# Altium footprint library Orion-Bridge.PcbLib: 19 footprints (part 1 of 2)
Each footprint in its own frame and in the unit in brackets; x right, y up, seen from the top. Pads: shape width x height; smd on the part's side, far side on the other; paste and mask are expansions set on the pad; w line width, h text height; cw(c..) or ccw(c..) is an arc to the next point about the centre after c.
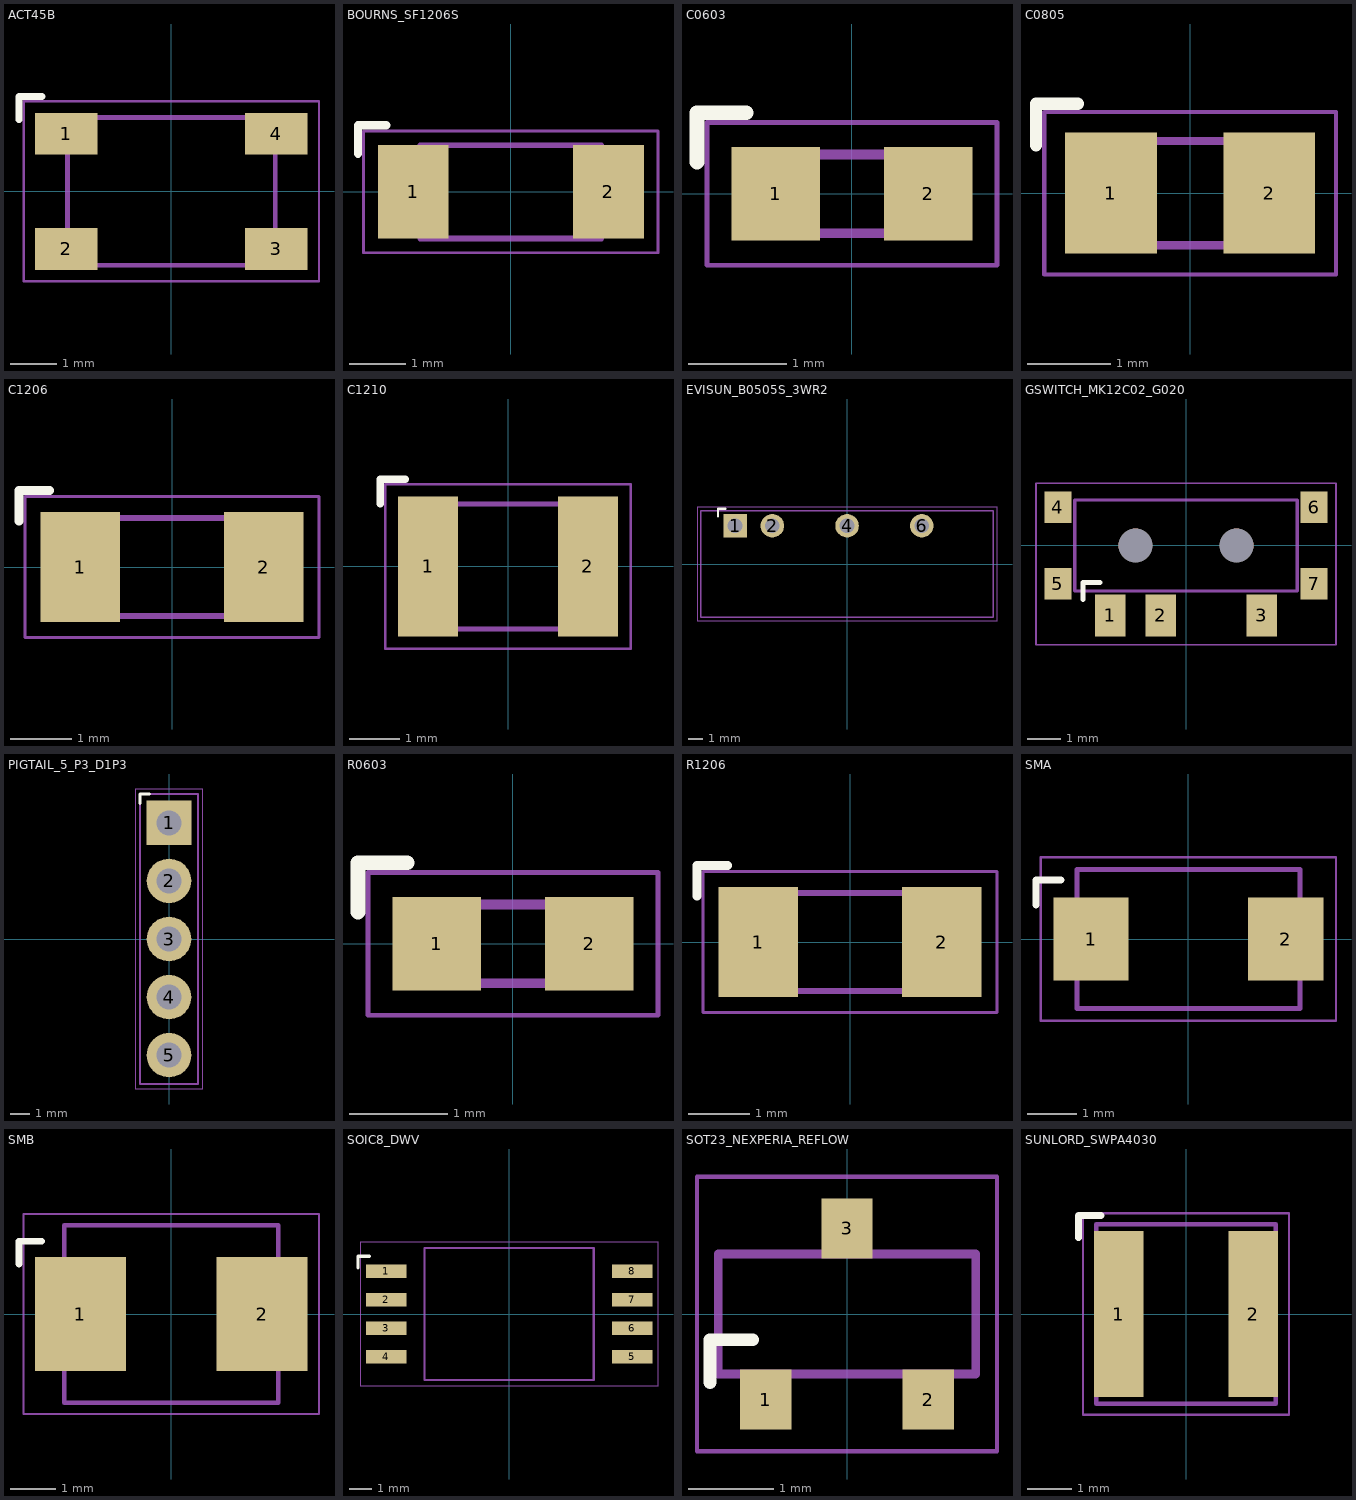
[diagram p0: the footprints below, top view; thin cyan lines are the x and y axes]

## ACT45B [mm] "TDK ACT45B recommended lands; windings 1-4 and 2-3"
height 2.8
pads (4):
  rect 1.35x0.9 smd: 1(-2.275,1.25) 2(-2.275,-1.25) 3(2.275,-1.25) 4(2.275,1.25)
Top Overlay:
  lines w0.15: -3.3,1.55 -3.3,2.05 -2.8,2.05
Component bodies:
  lines w0.1: -2.25,-1.6 2.25,-1.6 2.25,1.6 -2.25,1.6 -2.25,-1.6
Courtyards:
  lines w0.05: -3.2,-1.95 3.2,-1.95 3.2,1.95 -3.2,1.95 -3.2,-1.95
3D body: height 2.8, standoff 0.08, extent -2.25,-1.6 2.25,1.6
3D body: height 0.22, standoff 0.03, extent -2.525,1.01 -1.95,1.49
3D body: height 0.22, standoff 0.03, extent -2.525,-1.49 -1.95,-1.01
3D body: height 0.22, standoff 0.03, extent 1.95,-1.49 2.525,-1.01
3D body: height 0.22, standoff 0.03, extent 1.95,1.01 2.525,1.49

## BOURNS_SF1206S [mm] "Bourns SF-1206S recommended land pattern: total X span 4.7, inner gap 2.2, pad Y 1.65; maximum body envelope. No polarity."
height 0.7
pads (2):
  rect 1.25x1.65 smd: 1(-1.725,0) 2(1.725,0)
Top Overlay:
  lines w0.15: -2.7,0.675 -2.7,1.175 -2.2,1.175
Component bodies:
  lines w0.1: -1.6,-0.825 1.6,-0.825 1.6,0.825 -1.6,0.825 -1.6,-0.825
Courtyards:
  lines w0.05: -2.6,-1.075 2.6,-1.075 2.6,1.075 -2.6,1.075 -2.6,-1.075
3D body: height 0.7, standoff 0.08, extent -1.6,-0.825 1.6,0.825
3D body: height 0.71, standoff 0.03, extent -1.6,-0.833 -1.22,0.833
3D body: height 0.71, standoff 0.03, extent 1.22,-0.833 1.6,0.833

## C0603 [mm] "IPC-style 0603 solder lands; selected MPN dimensions reviewed separately."
height 0.8
pads (2):
  rect 0.9x0.95 smd: 1(-0.775,0) 2(0.775,0)
Top Overlay:
  lines w0.15: -1.575,0.325 -1.575,0.825 -1.075,0.825
Component bodies:
  lines w0.1: -0.8,-0.4 0.8,-0.4 0.8,0.4 -0.8,0.4 -0.8,-0.4
Courtyards:
  lines w0.05: -1.475,-0.725 1.475,-0.725 1.475,0.725 -1.475,0.725 -1.475,-0.725
3D body: height 0.8, standoff 0.08, extent -0.8,-0.4 0.8,0.4
3D body: height 0.81, standoff 0.03, extent -0.8,-0.407 -0.512,0.407
3D body: height 0.81, standoff 0.03, extent 0.512,-0.407 0.8,0.407

## C0805 [mm] "IPC-style 0805 solder lands; selected MPN dimensions reviewed separately."
height 0.8
pads (2):
  rect 1.1x1.45 smd: 1(-0.95,0) 2(0.95,0)
Top Overlay:
  lines w0.15: -1.85,0.575 -1.85,1.075 -1.35,1.075
Component bodies:
  lines w0.1: -1,-0.625 1,-0.625 1,0.625 -1,0.625 -1,-0.625
Courtyards:
  lines w0.05: -1.75,-0.975 1.75,-0.975 1.75,0.975 -1.75,0.975 -1.75,-0.975
3D body: height 0.8, standoff 0.08, extent -1,-0.625 1,0.625
3D body: height 0.81, standoff 0.03, extent -1,-0.633 -0.64,0.633
3D body: height 0.81, standoff 0.03, extent 0.64,-0.633 1,0.633

## C1206 [mm] "IPC-style 1206 solder lands; selected MPN dimensions reviewed separately."
height 1.5
pads (2):
  rect 1.3x1.8 smd: 1(-1.5,0) 2(1.5,0)
Top Overlay:
  lines w0.15: -2.5,0.75 -2.5,1.25 -2,1.25
Component bodies:
  lines w0.1: -1.6,-0.8 1.6,-0.8 1.6,0.8 -1.6,0.8 -1.6,-0.8
Courtyards:
  lines w0.05: -2.4,-1.15 2.4,-1.15 2.4,1.15 -2.4,1.15 -2.4,-1.15
3D body: height 1.5, standoff 0.08, extent -1.6,-0.8 1.6,0.8
3D body: height 1.52, standoff 0.03, extent -1.6,-0.807 -1.22,0.807
3D body: height 1.52, standoff 0.03, extent 1.22,-0.807 1.6,0.807

## C1210 [mm] "Samsung CL32B106KBJNNNE body3.2x2.5mm, nominal1210 land pattern selected."
height 2.7
pads (2):
  rect 1.2x2.8 smd: 1(-1.6,0) 2(1.6,0)
Top Overlay:
  lines w0.15: -2.55,1.25 -2.55,1.75 -2.05,1.75
Component bodies:
  lines w0.1: -1.6,-1.25 1.6,-1.25 1.6,1.25 -1.6,1.25 -1.6,-1.25
Courtyards:
  lines w0.05: -2.45,-1.65 2.45,-1.65 2.45,1.65 -2.45,1.65 -2.45,-1.65
3D body: height 2.7, standoff 0.08, extent -1.6,-1.25 1.6,1.25
3D body: height 2.72, standoff 0.03, extent -1.6,-1.258 -1.22,1.258
3D body: height 2.72, standoff 0.03, extent 1.22,-1.258 1.6,1.258

## EVISUN_B0505S_3WR2 [mm] "EVISUN p4: nominal19.65x7x10.16mm, unspecified body tolerance+/-0.25mm, lead1 x=2.21 from body left, pitch1-2=2.54/2-4=5.08/4-6=5.08mm. Pin row .90mm from long body edge. Bottom view mirrored vertically to PCB TOP: row Y=+2.60mm. Finished holes1.00mm, annulus.30mm. Primary/secondary pad copper gap3.48mm."
height 10.41
pads (4):
  rect 1.6x1.6 hole 1 paste-10: 1(-7.615,2.6)
  round 1.6 hole 1 paste-10: 2(-5.075,2.6) 4(0.005,2.6) 6(5.085,2.6)
Top Overlay:
  lines w0.15: -8.765,3.25 -8.765,3.75 -8.265,3.75
Component bodies:
  lines w0.1: -9.95,-3.625 9.95,-3.625 9.95,3.625 -9.95,3.625 -9.95,-3.625
Courtyards:
  lines w0.05: -10.2,-3.875 10.2,-3.875 10.2,3.875 -10.2,3.875 -10.2,-3.875
3D body: height 10.31, standoff 0.15, extent -9.825,-3.5 9.825,3.5
3D body: height 10.33, standoff 10.31, extent -8.2,-2.55 8.2,2.55
3D body: height 0.45, standoff -2.5, extent -7.865,2.35 -7.365,2.85
3D body: height 0.45, standoff -2.5, extent -5.325,2.35 -4.825,2.85
3D body: height 0.45, standoff -2.5, extent -0.245,2.35 0.255,2.85
3D body: height 0.45, standoff -2.5, extent 4.835,2.35 5.335,2.85

## GSWITCH_MK12C02_G020 [mm] "All shell tabs tied only to GND_LOGIC. No paste in NPTH. Keep travel envelope clear. Pin numbers1/2/3 assigned left/common/right as manufacturer circuit A/B; mounting pads4-7 are local library assignments."
height 1.4
pads (9):
  rect 0.9x1.25 smd: 1(-2.25,-2.075) 2(-0.75,-2.075) 3(2.25,-2.075)
  rect 0.8x0.93 smd: 4(-3.8,1.135) 5(-3.8,-1.135) 6(3.8,1.135) 7(3.8,-1.135)
  round 1 hole 1 unplated paste-10: ""(-1.5,0) ""(1.5,0)
Top Overlay:
  lines w0.15: -3.05,-1.6 -3.05,-1.1 -2.55,-1.1
Component bodies:
  lines w0.1: -3.3,-1.35 3.3,-1.35 3.3,1.35 -3.3,1.35 -3.3,-1.35
Courtyards:
  lines w0.05: -4.45,-2.95 4.45,-2.95 4.45,1.85 -4.45,1.85 -4.45,-2.95
3D body: height 1.25, standoff 0.05, extent -3.3,-1.35 3.3,1.35
3D body: height 1.4, standoff 1.25, extent -3.25,-1.3 3.25,1.3
3D body: height 1.25, standoff 0.15, extent -1.4,1.3 -0.1,3.35
3D body: height 0.15, standoff 0.02, extent -2.7,-2.7 -1.8,-1.45
3D body: height 0.15, standoff 0.02, extent -1.2,-2.7 -0.3,-1.45
3D body: height 0.15, standoff 0.02, extent 1.8,-2.7 2.7,-1.45
3D body: height 0.15, standoff 0.02, extent -4.2,0.67 -3.4,1.6
3D body: height 0.15, standoff 0.02, extent -4.2,-1.6 -3.4,-0.67
3D body: height 0.15, standoff 0.02, extent 3.4,0.67 4.2,1.6
3D body: height 0.15, standoff 0.02, extent 3.4,-1.6 4.2,-0.67

## PIGTAIL_5_P3_D1P3 [mm] "Designed carrier wire-solder interface, 3.0 pitch, 1.3 finished-hole target, 0.5 radial annulus. Pin numbering is logical NMEA: 1 shield, 2 NET-S, 3 NET-C, 4 CAN-H, 5 CAN-L. Cable and strain relief still require a physical selection."
height 3
pads (5):
  rect 2.3x2.3 hole 1.3 paste-10: 1(0,6)
  round 2.3 hole 1.3 paste-10: 2(0,3) 3(0,0) 4(0,-3) 5(0,-6)
Top Overlay:
  lines w0.15: -1.5,7 -1.5,7.5 -1,7.5
Component bodies:
  lines w0.1: -1.5,-7.5 1.5,-7.5 1.5,7.5 -1.5,7.5 -1.5,-7.5
Courtyards:
  lines w0.05: -1.75,-7.75 1.75,-7.75 1.75,7.75 -1.75,7.75 -1.75,-7.75
3D body: height 0.06, standoff 0.03, extent -1.15,4.85 1.15,5.03
3D body: height 0.06, standoff 0.03, extent -1.15,6.97 1.15,7.15
3D body: height 0.06, standoff 0.03, extent -1.15,5.03 -0.97,6.97
3D body: height 0.06, standoff 0.03, extent 0.97,5.03 1.15,6.97
3D body: height 0.06, standoff 0.03, extent -1.15,1.85 1.15,2.03
3D body: height 0.06, standoff 0.03, extent -1.15,3.97 1.15,4.15
3D body: height 0.06, standoff 0.03, extent -1.15,2.03 -0.97,3.97
3D body: height 0.06, standoff 0.03, extent 0.97,2.03 1.15,3.97
3D body: height 0.06, standoff 0.03, extent -1.15,-1.15 1.15,-0.97
3D body: height 0.06, standoff 0.03, extent -1.15,0.97 1.15,1.15
3D body: height 0.06, standoff 0.03, extent -1.15,-0.97 -0.97,0.97
3D body: height 0.06, standoff 0.03, extent 0.97,-0.97 1.15,0.97
3D body: height 0.06, standoff 0.03, extent -1.15,-4.15 1.15,-3.97
3D body: height 0.06, standoff 0.03, extent -1.15,-2.03 1.15,-1.85
3D body: height 0.06, standoff 0.03, extent -1.15,-3.97 -0.97,-2.03
3D body: height 0.06, standoff 0.03, extent 0.97,-3.97 1.15,-2.03
3D body: height 0.06, standoff 0.03, extent -1.15,-7.15 1.15,-6.97
3D body: height 0.06, standoff 0.03, extent -1.15,-5.03 1.15,-4.85
3D body: height 0.06, standoff 0.03, extent -1.15,-6.97 -0.97,-5.03
3D body: height 0.06, standoff 0.03, extent 0.97,-6.97 1.15,-5.03

## R0603 [mm] "IPC-style 0603 solder lands; selected MPN dimensions reviewed separately."
height 0.8
pads (2):
  rect 0.9x0.95 smd: 1(-0.775,0) 2(0.775,0)
Top Overlay:
  lines w0.15: -1.575,0.325 -1.575,0.825 -1.075,0.825
Component bodies:
  lines w0.1: -0.8,-0.4 0.8,-0.4 0.8,0.4 -0.8,0.4 -0.8,-0.4
Courtyards:
  lines w0.05: -1.475,-0.725 1.475,-0.725 1.475,0.725 -1.475,0.725 -1.475,-0.725
3D body: height 0.8, standoff 0.08, extent -0.8,-0.4 0.8,0.4
3D body: height 0.81, standoff 0.03, extent -0.8,-0.407 -0.512,0.407
3D body: height 0.81, standoff 0.03, extent 0.512,-0.407 0.8,0.407

## R1206 [mm] "IPC-style 1206 solder lands; selected MPN dimensions reviewed separately."
height 1.5
pads (2):
  rect 1.3x1.8 smd: 1(-1.5,0) 2(1.5,0)
Top Overlay:
  lines w0.15: -2.5,0.75 -2.5,1.25 -2,1.25
Component bodies:
  lines w0.1: -1.6,-0.8 1.6,-0.8 1.6,0.8 -1.6,0.8 -1.6,-0.8
Courtyards:
  lines w0.05: -2.4,-1.15 2.4,-1.15 2.4,1.15 -2.4,1.15 -2.4,-1.15
3D body: height 1.5, standoff 0.08, extent -1.6,-0.8 1.6,0.8
3D body: height 1.52, standoff 0.03, extent -1.6,-0.807 -1.22,0.807
3D body: height 1.52, standoff 0.03, extent 1.22,-0.807 1.6,0.807

## SMA [mm] "MDD SS12-SS1200 Rev2025A3 p3 / SS22-SS2200 Rev2024A4 p3 suggested SMA pattern: pad1.52x1.68, centrepitch3.93, innergap2.41, totalX5.45mm. Maxbody4.5x2.8x2.45; pin1Kleft,2Aright. Visually checked selected C2480/C14238 PDFs."
height 2.45
pads (2):
  rect 1.52x1.68 smd: 1(-1.965,0) 2(1.965,0)
Top Overlay:
  lines w0.15: -3.075,0.69 -3.075,1.19 -2.575,1.19
Component bodies:
  lines w0.1: -2.25,-1.4 2.25,-1.4 2.25,1.4 -2.25,1.4 -2.25,-1.4
Courtyards:
  lines w0.05: -2.975,-1.65 2.975,-1.65 2.975,1.65 -2.975,1.65 -2.975,-1.65
3D body: height 2.45, standoff 0.08, extent -2.25,-1.4 2.25,1.4
3D body: height 0.2, standoff 0.03, extent -2.54,-0.84 -1.39,0.84
3D body: height 0.2, standoff 0.03, extent 1.39,-0.84 2.54,0.84
3D body: height 2.46, standoff 2.45, extent -1.52,-1.372 -1.27,1.372

## SMB [mm] "BORN SMBJ Series Rev2022-Jan-1-A p7 manufacturer pattern: pad2.0x2.5mm, innergap2.0mm, centres+/-2.0mm; maxbody4.7x3.9x2.5; pin1Kleft,2Aright. Visually checked selected C152104 PDF."
height 2.5
pads (2):
  rect 2x2.5 smd: 1(-2,0) 2(2,0)
Top Overlay:
  lines w0.15: -3.35,1.1 -3.35,1.6 -2.85,1.6
Component bodies:
  lines w0.1: -2.35,-1.95 2.35,-1.95 2.35,1.95 -2.35,1.95 -2.35,-1.95
Courtyards:
  lines w0.05: -3.25,-2.2 3.25,-2.2 3.25,2.2 -3.25,2.2 -3.25,-2.2
3D body: height 2.5, standoff 0.08, extent -2.35,-1.95 2.35,1.95
3D body: height 0.2, standoff 0.03, extent -2.575,-1.05 -1.425,1.05
3D body: height 0.2, standoff 0.03, extent 1.425,-1.05 2.575,1.05
3D body: height 2.51, standoff 2.5, extent -1.582,-1.911 -1.332,1.911

## SOIC8_DWV [mm] "TI DWV0008A manufacturer land pattern; pin 1 upper left"
height 2.8
pads (8):
  rect 1.8x0.6 smd: 1(-5.45,1.905) 2(-5.45,0.635) 3(-5.45,-0.635) 4(-5.45,-1.905) 5(5.45,-1.905) 6(5.45,-0.635) 7(5.45,0.635) 8(5.45,1.905)
Top Overlay:
  lines w0.15: -6.7,2.055 -6.7,2.555 -6.2,2.555
Component bodies:
  lines w0.1: -3.75,-2.925 3.75,-2.925 3.75,2.925 -3.75,2.925 -3.75,-2.925
Courtyards:
  lines w0.05: -6.6,-3.175 6.6,-3.175 6.6,3.175 -6.6,3.175 -6.6,-3.175
3D body: height 2.8, standoff 0.08, extent -3.75,-2.925 3.75,2.925
3D body: height 0.22, standoff 0.03, extent -5.7,1.665 -3.45,2.145
3D body: height 0.22, standoff 0.03, extent -5.7,0.395 -3.45,0.875
3D body: height 0.22, standoff 0.03, extent -5.7,-0.875 -3.45,-0.395
3D body: height 0.22, standoff 0.03, extent -5.7,-2.145 -3.45,-1.665
3D body: height 0.22, standoff 0.03, extent 3.45,-2.145 5.7,-1.665
3D body: height 0.22, standoff 0.03, extent 3.45,-0.875 5.7,-0.395
3D body: height 0.22, standoff 0.03, extent 3.45,0.395 5.7,0.875
3D body: height 0.22, standoff 0.03, extent 3.45,1.665 5.7,2.145
3D body: height 2.82, standoff 2.8, extent -2.38,1.625 -2.12,1.885

## SOT23_NEXPERIA_REFLOW [mm] "Nexperia SOT23 reflow footprint Fig10: 0.6 x 0.7 copper lands, 1.9 pin pitch and 2.0 row centres. Drawing is rotated 180 degrees to match existing top-view pin1 lower left, pin2 lower right, pin3 upper centre. Paste suggested0.5 x0.6, mask opening1.0 x1.0; set fabrication-specific expansions accordingly."
height 1.1
pads (3):
  rect 0.6x0.7 smd: 1(-0.95,-1) 2(0.95,-1) 3(0,1)
Top Overlay:
  lines w0.15: -1.6,-0.8 -1.6,-0.3 -1.1,-0.3
Component bodies:
  lines w0.1: -1.5,-0.7 1.5,-0.7 1.5,0.7 -1.5,0.7 -1.5,-0.7
Courtyards:
  lines w0.05: -1.75,-1.6 1.75,-1.6 1.75,1.6 -1.75,1.6 -1.75,-1.6
3D body: height 1.1, standoff 0.08, extent -1.5,-0.7 1.5,0.7
3D body: height 0.22, standoff 0.03, extent -1.175,-1.25 -0.725,-0.4
3D body: height 0.22, standoff 0.03, extent 0.725,-1.25 1.175,-0.4
3D body: height 0.22, standoff 0.03, extent -0.225,0.4 0.225,1.25
3D body: height 1.11, standoff 1.1, extent -1.03,-0.55 -0.77,-0.29

## SUNLORD_SWPA4030 [mm] "Sunlord SWPA datasheet2025-05-08 p2 recommended SWPA4030S pattern: gap1.9, padwidth1.1, padheight3.7."
height 3
pads (2):
  rect 1.1x3.7 smd: 1(-1.5,0) 2(1.5,0)
Top Overlay:
  lines w0.15: -2.4,1.7 -2.4,2.2 -1.9,2.2
Component bodies:
  lines w0.1: -2,-2 2,-2 2,2 -2,2 -2,-2
Courtyards:
  lines w0.05: -2.3,-2.25 2.3,-2.25 2.3,2.25 -2.3,2.25 -2.3,-2.25
3D body: height 3, standoff 0.1, extent -2,-2 2,2
3D body: height 3.02, standoff 3, extent -1.6,-1.6 1.6,1.6
3D body: height 0.18, standoff 0.03, extent -1.94,-1.48 -1.06,1.48
3D body: height 0.18, standoff 0.03, extent 1.06,-1.48 1.94,1.48